# Altium schematic symbol library DF51A-4DP-2DSA.SchLib: 1 symbol
Pins are listed as number, name and electrical type; pins without a type are passive.

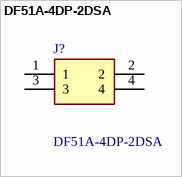
[diagram p0: symbol DF51A-4DP-2DSA]

## DF51A-4DP-2DSA
designator J?
Headers & Wire Housings 4P 2R STRAIGHT HEADER TIN; Manufacturer_Name: Hirose; Geometry.Height: 8.7mm; Manufacturer_Part_Number: DF51A-4DP-2DSA; Mouser Part Number: 798-DF51A-4DP-2DSA; Mouser Price/Stock: https://www.mouser.co.uk/ProductDetail/Hirose-Connector/DF51A-4DP-2DSA?qs=MLItCLRbWsw154eoU7l7xw%3D%3D; Arrow Part Number: *; Arrow Price/Stock: *; Datasheet Link: https://www.hirose.com/en/product/document?clcode=CL0543-5015-0-00&productname=DF51A-4DP-2DSA&series=DF51&documenttype=2DDrawing&lang=en&documentid=0001126053
footprint SHDR4W60P200X200_2X2_1110X730X870P
pins: 1, 2, 3, 4